# Altium footprint library MyPCBLib.PcbLib: 103 footprints (part 3 of 7)
Each footprint in its own frame and in the unit in brackets; x right, y up, seen from the top. Pads: shape width x height; smd on the part's side, far side on the other; paste and mask are expansions set on the pad; w line width, h text height; cw(c..) or ccw(c..) is an arc to the next point about the centre after c.
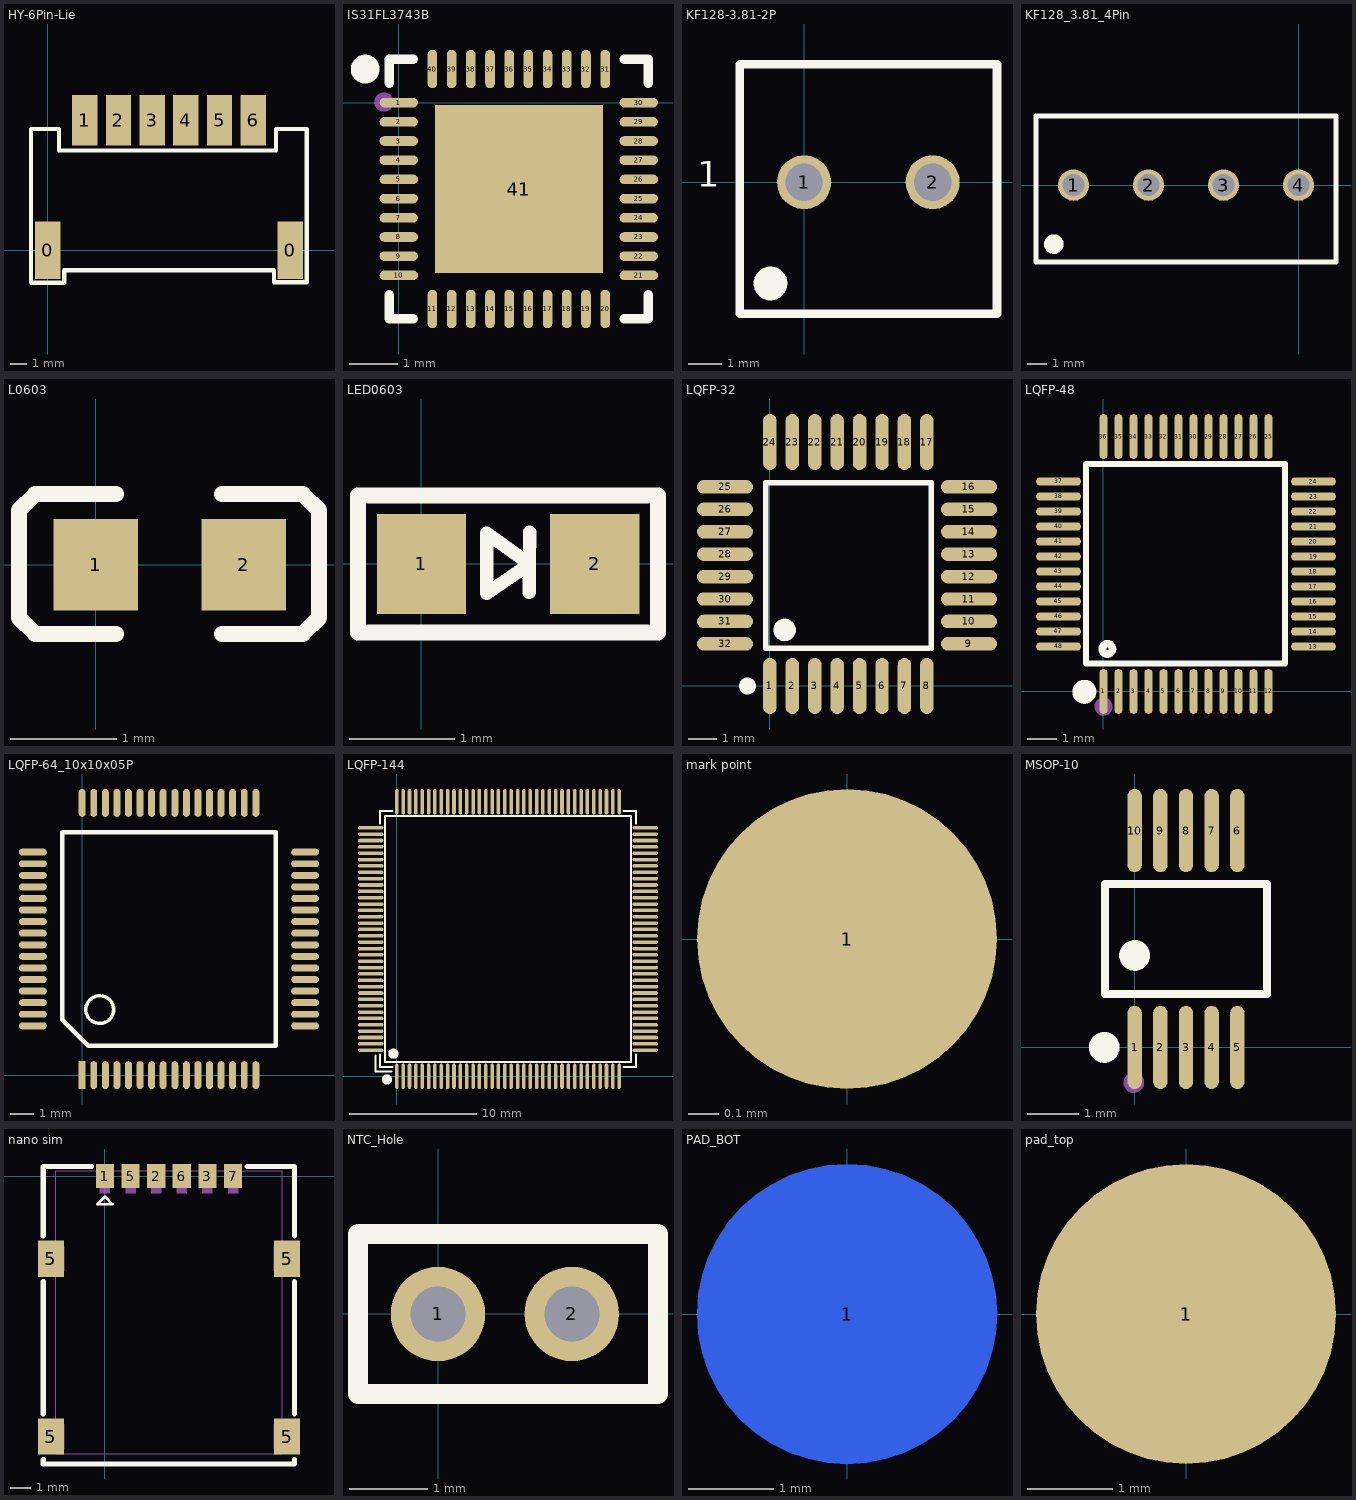
[diagram p2: the footprints below, top view; thin cyan lines are the x and y axes]

## HY-6Pin-Lie [mm]
pads (8):
  rect 1.5x3.4 smd: 0(0,0) 0(14.4,0)
  rect 1.5x3 smd: 1(2.2,7.7) 2(4.2,7.7) 3(6.2,7.7) 4(8.2,7.7) 5(10.2,7.7) 6(12.2,7.7)
Top Overlay:
  lines w0.254: -0.984,-1.936 -0.984,7.192 0.676,7.192 0.676,5.922 1.311,5.922 7.609,5.922 9.826,5.922 13.545,5.922 13.545,7.197 15.367,7.197 15.367,-1.905 13.424,-1.905 13.424,-1.19 12.995,-1.19 7.026,-1.19 4.994,-1.19 0.985,-1.19 0.985,-1.936 -0.984,-1.936

## IS31FL3743B [mm]
pads (41):
  oval 0.8x0.2 smd: 1(0,0) 2(0,-0.4) 3(0,-0.8) 4(0,-1.2) 5(0,-1.6) 6(0,-2) 7(0,-2.4) 8(0,-2.8) 9(0,-3.2) 10(0,-3.6) 21(5,-3.6) 22(5,-3.2) 23(5,-2.8) 24(5,-2.4) 25(5,-2) 26(5,-1.6) 27(5,-1.2) 28(5,-0.8) 29(5,-0.4) 30(5,0)
  oval 0.2x0.8 smd: 11(0.7,-4.3) 12(1.101,-4.3) 13(1.499,-4.3) 14(1.901,-4.3) 15(2.299,-4.3) 16(2.701,-4.3) 17(3.1,-4.3) 18(3.501,-4.3) 19(3.9,-4.3) 20(4.3,-4.3) 31(4.3,0.7) 32(3.899,0.7) 33(3.501,0.7) 34(3.099,0.7) 35(2.701,0.7) 36(2.299,0.7) 37(1.9,0.7) 38(1.499,0.7) 39(1.1,0.7) 40(0.7,0.7)
  rect 3.5x3.5 smd: 41(2.5,-1.8)
Top Overlay:
  lines w0.2: -0.2,-4 -0.2,-4.5 0.3,-4.5 ; -0.2,0.4 -0.2,0.9 0.3,0.9 ; 4.7,-4.5 5.2,-4.5 5.2,-4 ; 4.7,0.9 5.2,0.9 5.2,0.4
  lines w0.3: -0.551,0.697 cw(c-0.701,0.698) -0.551,0.699
Top Paste:
  drawing of 41 lines, arcs and shapes, not listed
Mechanical 15:
  circle w0.2: c-0.312,0.012 r0.1

## KF128-3.81-2P [mm]
pads (2):
  round 1.6 hole 1.1: 1(0,0) 2(3.81,0)
Top Overlay:
  circle w0.5: c-1,-3 r0.25
  lines w0.254: -1.905,-3.9 5.715,-3.9 5.715,3.5 -1.905,3.5 -1.905,-3.9
  text "1" at -3.175,-0.381 h1.3

## KF128_3.81_4Pin [mm]
pads (4):
  round 1.6 hole 1.1: 1(-11.43,0) 2(-7.62,0) 3(-3.81,0) 4(0,0)
Top Overlay:
  circle w0.5: c-12.43,-3 r0.25
  lines w0.254: -13.335,-3.9 -13.335,3.5 1.905,3.5 1.905,-3.9 -13.335,-3.9

## L0603 [mm]
pads (2):
  rect 0.8x0.864 smd: 1(0,0) 2(1.4,0)
Top Overlay:
  lines w0.152: 0.19,-0.651 -0.572,-0.651 -0.724,-0.499 -0.724,0.517 -0.572,0.67 0.19,0.67 ; 1.196,-0.651 1.958,-0.651 2.111,-0.499 2.111,0.517 1.958,0.67 1.196,0.67
Top Paste:
  region: 0.964,0.154 0.964,-0.122 1.238,-0.416 1.741,-0.416 1.805,-0.352 1.805,0.384 1.741,0.448 1.238,0.448
  region: 0.448,0.143 0.448,-0.134 0.174,-0.427 -0.329,-0.427 -0.393,-0.363 -0.393,0.373 -0.329,0.437 0.174,0.437

## LED0603 [mm]
pads (2):
  rect 0.85x0.95 smd: 1(0,0) 2(1.65,0)
Top Overlay:
  lines w0.127: 1.026,-0.273 1.029,0 ; 1.029,0 1.03,0.302 1.029,0 ; 1.029,0 0.621,-0.282 0.621,0.292 1.029,0
  lines w0.152: -0.604,-0.654 2.252,-0.654 2.252,-0.635 2.252,0.651 -0.604,0.651 -0.604,-0.654

## LQFP-32 [mm]
pads (32):
  oval 0.48x2 smd: 1(0,0) 2(0.8,0) 3(1.6,0) 4(2.4,0) 5(3.198,0) 6(3.998,0) 7(4.798,0) 8(5.598,0) 17(5.598,8.7) 18(4.798,8.7) 19(3.998,8.7) 20(3.198,8.7) 21(2.4,8.7) 22(1.6,8.7) 23(0.8,8.7) 24(0,8.7)
  oval 2x0.48 smd: 9(7.099,1.501) 10(7.099,2.301) 11(7.099,3.101) 12(7.099,3.901) 13(7.099,4.699) 14(7.099,5.499) 15(7.099,6.299) 16(7.099,7.099) 25(-1.601,7.099) 26(-1.601,6.299) 27(-1.601,5.499) 28(-1.601,4.699) 29(-1.601,3.901) 30(-1.601,3.101) 31(-1.601,2.301) 32(-1.601,1.501)
Top Overlay:
  lines w0.2: -0.151,1.35 -0.151,7.25 5.749,7.25 5.749,1.35 -0.151,1.35
  lines w0.3: -0.8,0.15 ccw(c-0.799,0) -0.798,0.15
  lines w0.4: 0.523,2.199 ccw(c0.526,1.999) 0.528,2.199

## LQFP-48 [mm]
pads (48):
  oval 0.27x1.5 smd: 1(0,0) 2(0.5,0) 3(1,0) 4(1.5,0) 5(2,0) 6(2.5,0) 7(3,0) 8(3.5,0) 9(4,0) 10(4.5,0) 11(5,0) 12(5.5,0) 25(5.5,8.5) 26(5,8.5) 27(4.5,8.5) 28(4,8.5) 29(3.5,8.5) 30(3,8.5) 31(2.5,8.5) 32(2,8.5) 33(1.5,8.5) 34(1,8.5) 35(0.5,8.5) 36(0,8.5)
  oval 1.5x0.27 smd: 13(7,1.5) 14(7,2) 15(7,2.5) 16(7,3) 17(7,3.5) 18(7,4) 19(7,4.5) 20(7,5) 21(7,5.5) 22(7,6) 23(7,6.5) 24(7,7) 37(-1.5,7) 38(-1.5,6.5) 39(-1.5,6) 40(-1.5,5.5) 41(-1.5,5) 42(-1.5,4.5) 43(-1.5,4) 44(-1.5,3.5) 45(-1.5,3) 46(-1.5,2.5) 47(-1.5,2) 48(-1.5,1.5)
Top Overlay:
  circle w0.254: c0.13,1.42 r0.17
  lines w0.2: -0.145,7.59 6.052,7.59 6.052,0.935 -0.577,0.935 -0.577,7.59 0.185,7.59
  lines w0.4: -0.64,0.19 ccw(c-0.639,-0.01) -0.637,0.19
Mechanical 15:
  circle w0.3: c0,-0.5 r0.15

## LQFP-64_10x10x05P [mm]
pads (64):
  rect 0.3x1.2 smd: 1(0,0)
  oval 0.3x1.2 smd: 2(0.5,0) 3(1,0) 4(1.5,0) 5(2,0) 6(2.5,0) 7(3,0) 8(3.5,0) 9(4,0) 10(4.5,0) 11(5,0) 12(5.5,0) 13(6,0) 14(6.5,0) 15(7,0) 16(7.5,0) 33(7.5,11.754) 34(7,11.754) 35(6.5,11.754) 36(6,11.754) 37(5.5,11.754) 38(5,11.754) 39(4.5,11.754) 40(4,11.754) 41(3.5,11.754) 42(3,11.754) 43(2.5,11.754) 44(2,11.754) 45(1.5,11.754) 46(1,11.754) 47(0.5,11.754) 48(0,11.754)
  oval 1.2x0.3 smd: 17(9.627,2.127) 18(9.627,2.627) 19(9.627,3.127) 20(9.627,3.627) 21(9.627,4.127) 22(9.627,4.627) 23(9.627,5.127) 24(9.627,5.627) 25(9.627,6.127) 26(9.627,6.627) 27(9.627,7.127) 28(9.627,7.627) 29(9.627,8.127) 30(9.627,8.627) 31(9.627,9.127) 32(9.627,9.627) 49(-2.127,9.627) 50(-2.127,9.127) 51(-2.127,8.627) 52(-2.127,8.127) 53(-2.127,7.627) 54(-2.127,7.127) 55(-2.127,6.627) 56(-2.127,6.127) 57(-2.127,5.627) 58(-2.127,5.127) 59(-2.127,4.627) 60(-2.127,4.127) 61(-2.127,3.627) 62(-2.127,3.127) 63(-2.127,2.627) 64(-2.127,2.127)
Top Overlay:
  circle w0.152: c0.762,2.829 r0.6
  lines w0.2: -0.865,2.397 -0.865,10.492 8.365,10.492 8.365,1.262 0.27,1.262 -0.865,2.397

## LQFP-144 [mm]
pads (144):
  oval 0.28x2 smd: 1(0,0) 2(0.5,0) 3(1,0) 4(1.5,0) 5(2,0) 6(2.5,0) 7(3,0) 8(3.5,0) 9(4,0) 10(4.5,0) 11(5,0) 12(5.5,0) 13(6,0) 14(6.5,0) 15(7,0) 16(7.5,0) 17(8,0) 18(8.5,0) 19(9,0) 20(9.5,0) 21(10,0) 22(10.5,0) 23(11,0) 24(11.5,0) 25(12,0) 26(12.5,0) 27(13,0) 28(13.5,0) 29(14,0) 30(14.5,0) 31(15,0) 32(15.5,0) 33(16,0) 34(16.5,0) 35(17,0) 36(17.5,0) 73(17.5,21.6) 74(17,21.6) 75(16.5,21.6) 76(16,21.6) 77(15.5,21.6) 78(15,21.6) 79(14.5,21.6) 80(14,21.6) 81(13.5,21.6) 82(13,21.6) 83(12.5,21.6) 84(12,21.6) 85(11.5,21.6) 86(11,21.6) 87(10.5,21.6) 88(10,21.6) 89(9.5,21.6) 90(9,21.6) 91(8.5,21.6) 92(8,21.6) 93(7.5,21.6) 94(7,21.6) 95(6.5,21.6) 96(6,21.6) 97(5.5,21.6) 98(5,21.6) 99(4.5,21.6) 100(4,21.6) 101(3.5,21.6) 102(3,21.6) 103(2.5,21.6) 104(2,21.6) 105(1.5,21.6) 106(1,21.6) 107(0.5,21.6) 108(0,21.6)
  oval 2x0.28 smd: 37(19.55,2.05) 38(19.55,2.55) 39(19.55,3.05) 40(19.55,3.55) 41(19.55,4.05) 42(19.55,4.55) 43(19.55,5.05) 44(19.55,5.55) 45(19.55,6.05) 46(19.55,6.55) 47(19.55,7.05) 48(19.55,7.55) 49(19.55,8.05) 50(19.55,8.55) 51(19.55,9.05) 52(19.55,9.55) 53(19.55,10.05) 54(19.55,10.55) 55(19.55,11.05) 56(19.55,11.55) 57(19.55,12.05) 58(19.55,12.55) 59(19.55,13.05) 60(19.55,13.55) 61(19.55,14.05) 62(19.55,14.55) 63(19.55,15.05) 64(19.55,15.55) 65(19.55,16.05) 66(19.55,16.55) 67(19.55,17.05) 68(19.55,17.55) 69(19.55,18.05) 70(19.55,18.55) 71(19.55,19.05) 72(19.55,19.55) 109(-2.05,19.55) 110(-2.05,19.05) 111(-2.05,18.55) 112(-2.05,18.05) 113(-2.05,17.55) 114(-2.05,17.05) 115(-2.05,16.55) 116(-2.05,16.05) 117(-2.05,15.55) 118(-2.05,15.05) 119(-2.05,14.55) 120(-2.05,14.05) 121(-2.05,13.55) 122(-2.05,13.05) 123(-2.05,12.55) 124(-2.05,12.05) 125(-2.05,11.55) 126(-2.05,11.05) 127(-2.05,10.55) 128(-2.05,10.05) 129(-2.05,9.55) 130(-2.05,9.05) 131(-2.05,8.55) 132(-2.05,8.05) 133(-2.05,7.55) 134(-2.05,7.05) 135(-2.05,6.55) 136(-2.05,6.05) 137(-2.05,5.55) 138(-2.05,5.05) 139(-2.05,4.55) 140(-2.05,4.05) 141(-2.05,3.55) 142(-2.05,3.05) 143(-2.05,2.55) 144(-2.05,2.05)
Top Overlay:
  circle w0.4: c-0.775,-0.249 r0.2
  circle w0.4: c-0.267,1.783 r0.2
  lines w0.152: -1.664,1.656 -1.664,0.386 -0.394,0.386 ; -1.326,1.72 -1.326,0.724 -0.33,0.724 ; -1.326,19.881 -1.326,20.876 -0.33,20.876 ; 17.831,0.724 18.826,0.724 18.826,1.72 ; 17.831,20.876 18.826,20.876 18.826,19.881 ; -0.921,1.129 -0.921,20.471 18.421,20.471 18.421,1.129 -0.921,1.129

## mark point [mm]
pads (1):
  round 1 smd mask+1.5: 1(0,0)

## MSOP-10 [mm]
pads (10):
  oval 0.28x1.62 smd: 1(0,0) 2(0.5,0) 3(1,0) 4(1.5,0) 5(2,0) 6(2,4.22) 7(1.5,4.22) 8(1,4.22) 9(0.5,4.22) 10(0,4.22)
Top Overlay:
  circle w0.3: c-0.592,0 r0.15
  circle w0.3: c0,1.791 r0.15
  lines w0.152: -0.576,1.039 2.576,1.039 2.576,3.181 -0.576,3.181 -0.576,1.039
Mechanical 15:
  circle w0.2: c-0.016,-0.684 r0.1

## nano sim [mm]
pads (10):
  rect 0.899x1.199 smd mask+0.051: 1(0,0) 2(2.54,0) 3(5.08,0) 5(1.27,0) 6(3.81,0) 7(6.35,0)
  rect 1.3x1.801 smd mask+0.051: 5(-2.675,-12.898) 5(-2.675,-4.1) 5(9.025,-12.898) 5(9.025,-4.1)
Top Overlay:
  lines w0.127: -0.384,-1.399 0.378,-1.399 -0.003,-1.018 -0.384,-1.399
  lines w0.254: -3.056,-14.031 -3.056,-14.26 9.39,-14.26 9.39,-14.031 ; -3.056,-11.768 -3.056,-5.23 ; -3.056,-2.967 -3.056,0.472 -0.676,0.472 ; 7.036,0.472 9.39,0.472 9.39,0.345 9.39,-2.967 ; 9.39,-11.768 9.39,-5.23
Mechanical 15:
  region: 8.374,-3.5 9.375,-3.5 9.375,-4.699 8.374,-4.699
  region: 8.374,-12.299 9.375,-12.299 9.375,-13.5 8.374,-13.5
  region: -3.025,-12.299 -2.024,-12.299 -2.024,-13.5 -3.025,-13.5
  region: -3.025,-3.5 -2.024,-3.5 -2.024,-4.699 -3.025,-4.699
  region: 6.101,0.358 6.599,0.358 6.599,-0.843 6.101,-0.843
  region: 4.831,0.358 5.329,0.358 5.329,-0.843 4.831,-0.843
  region: 3.561,0.358 4.059,0.358 4.059,-0.843 3.561,-0.843
  region: 2.291,0.358 2.789,0.358 2.789,-0.843 2.291,-0.843
  region: 1.021,0.358 1.519,0.358 1.519,-0.843 1.021,-0.843
  region: -0.249,0.358 0.249,0.358 0.249,-0.843 -0.249,-0.843
  region: -2.964,0.358 -2.964,0.383 -3,0.419 -3.05,0.419 -3.086,0.383 -3.086,0.358 -3.086,0.333 -3.05,0.297 -3,0.297 -2.964,0.333
  lines w0.051: -2.426,-13.744 8.776,-13.744 8.776,0.257 -2.426,0.257 -2.426,-13.744

## NTC_Hole [mm]
pads (2):
  round 1.2 hole 0.7: 1(0,0) 2(1.7,0)
Top Overlay:
  lines w0.254: 2.119,-1.016 -0.381,-1.016 ; -0.381,-1.016 -1.016,-1.016 -1.016,1.016 -0.381,1.016 2.119,1.016 2.794,1.016 2.794,-1.016 -0.381,-1.016 ; -0.381,-1.016 -0.381,-1.016

## PAD_BOT [mm]
pads (1):
  round 3.5 smd far side: 1(0,0)

## pad_top [mm]
pads (1):
  round 3.5 smd: 1(0,0)